# Altium schematic symbol library Components - 23.09.26 - 15.18.SchLib: 1 symbol
Pins are listed as number, name and electrical type; pins without a type are passive.

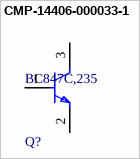
[diagram p0: symbol CMP-14406-000033-1]

## CMP-14406-000033-1
designator Q?, comment BC847C,235
TRANS NPN 45V 100MA TO236AB; RoHS Compliant: Yes
footprint FP-SOT23-IPC_C
footprint FP-SOT23-IPC_A
footprint FP-SOT23-IPC_B
footprint FP-SOT23-MFG
pins: 1 B, 2 E, 3 C